# Altium footprint library SMD Slide Switch.PcbLib: 1 footprints
Each footprint in its own frame and in the unit in brackets; x right, y up, seen from the top. Pads: shape width x height; smd on the part's side, far side on the other; paste and mask are expansions set on the pad; w line width, h text height; cw(c..) or ccw(c..) is an arc to the next point about the centre after c.
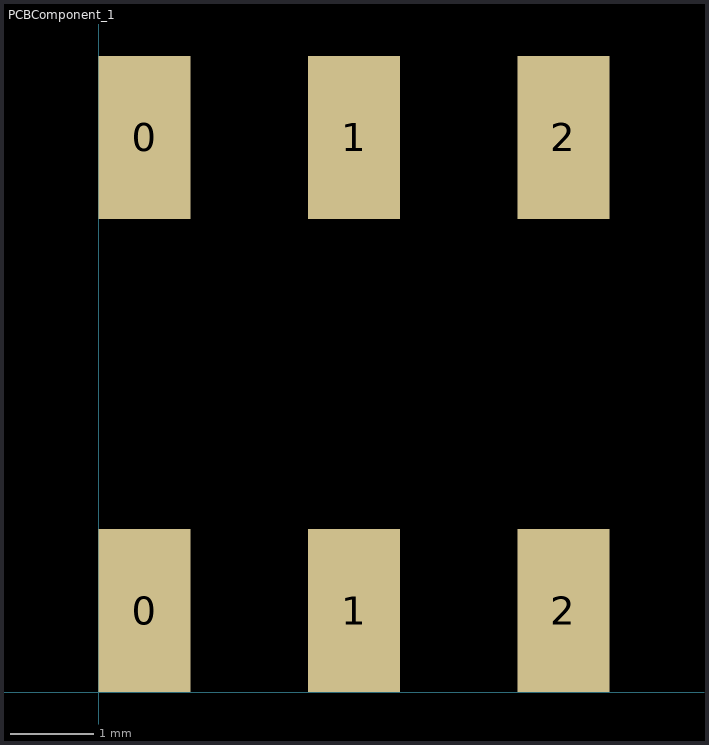
[diagram p0: the footprint, top view; thin cyan lines are the x and y axes]

## PCBComponent_1 [mm]
pads (6):
  rect 1.1x1.95 smd: 0(0.55,0.975) 0(0.55,6.625) 1(3.05,0.975) 1(3.05,6.625) 2(5.55,0.975) 2(5.55,6.625)
3D body "Miniature SMD SMT Slide Switch.STEP": height 5, standoff 0, extent -1.63,0.36 7.62,7.26